# Altium footprint library PcbLib1.PcbLib: 83 footprints (part 6 of 6)
Each footprint in its own frame and in the unit in brackets; x right, y up, seen from the top. Pads: shape width x height; smd on the part's side, far side on the other; paste and mask are expansions set on the pad; w line width, h text height; cw(c..) or ccw(c..) is an arc to the next point about the centre after c.
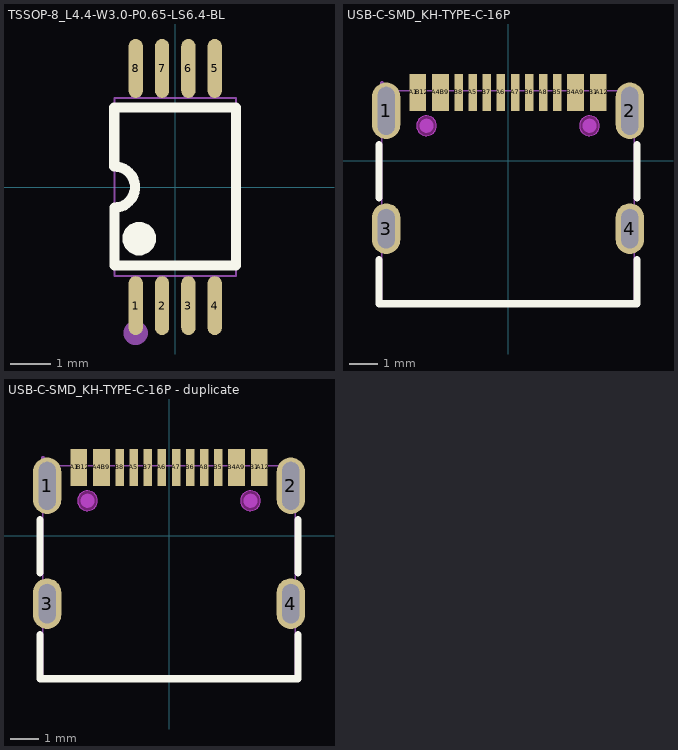
[diagram p5: the footprints below, top view; thin cyan lines are the x and y axes]

## TSSOP-8_L4.4-W3.0-P0.65-LS6.4-BL [mm]
pads (8):
  oval 0.353x1.454 smd paste+0.051: 1(-0.975,-2.927) 2(-0.325,-2.927) 3(0.325,-2.927) 4(0.975,-2.927) 5(0.975,2.927) 6(0.325,2.927) 7(-0.325,2.927) 8(-0.975,2.927)
Top Overlay:
  region: -1.293,-1.27 -1.294,-1.189 -1.233,-1.04 -1.119,-0.925 -0.97,-0.863 -0.808,-0.863 -0.659,-0.925 -0.545,-1.04 -0.484,-1.189 -0.485,-1.27 -0.484,-1.351 -0.545,-1.5 -0.659,-1.615 -0.808,-1.677 -0.97,-1.677 -1.119,-1.615 -1.233,-1.5 -1.294,-1.351 -1.293,-1.27
  lines w0.254: -1.501,1.966 -1.501,0.508 cw(c-1.501,0) -1.5,-0.508 -1.5,-1.938 1.5,-1.938 1.5,1.966 -1.5,1.966
Mechanical 6:
  circle w0.3: c-0.975,-3.6 r0.15
Mechanical 7:
  lines w0.051: -1.5,-2.2 1.5,-2.2 1.5,2.2 -1.5,2.2 -1.5,-2.2
Mechanical 8:
  region: -0.949,-1.27 -0.949,-1.245 -0.914,-1.21 -0.864,-1.21 -0.829,-1.245 -0.829,-1.27 -0.829,-1.295 -0.864,-1.33 -0.914,-1.33 -0.949,-1.295 -0.949,-1.27
Mechanical 9:
  region: 0.865,3.2 0.865,2.7 1.085,2.7 1.085,3.2
  region: 0.215,3.2 0.215,2.7 0.435,2.7 0.435,3.2
  region: -0.435,3.2 -0.435,2.7 -0.215,2.7 -0.215,3.2
  region: -1.085,3.2 -1.085,2.7 -0.865,2.7 -0.865,3.2
  region: 0.865,-3.2 0.865,-2.7 1.085,-2.7 1.085,-3.2
  region: 0.215,-3.2 0.215,-2.7 0.435,-2.7 0.435,-3.2
  region: -0.435,-3.2 -0.435,-2.7 -0.215,-2.7 -0.215,-3.2
  region: -1.085,-3.2 -1.085,-2.7 -0.865,-2.7 -0.865,-3.2
Mechanical 10:
  region: 0.865,2.71 0.865,2.19 1.085,2.19 1.085,2.71
  region: 0.215,2.71 0.215,2.19 0.435,2.19 0.435,2.71
  region: -0.435,2.71 -0.435,2.19 -0.215,2.19 -0.215,2.71
  region: -1.085,2.71 -1.085,2.19 -0.865,2.19 -0.865,2.71
  region: 0.865,-2.71 0.865,-2.19 1.085,-2.19 1.085,-2.71
  region: 0.215,-2.71 0.215,-2.19 0.435,-2.19 0.435,-2.71
  region: -0.435,-2.71 -0.435,-2.19 -0.215,-2.19 -0.215,-2.71
  region: -1.085,-2.71 -1.085,-2.19 -0.865,-2.19 -0.865,-2.71

## USB-C-SMD_KH-TYPE-C-16P [mm]
pads (20):
  oval 1x2 hole 0.6 slot 1.7 at 90 deg paste+0.051: 1(-4.32,1.765) 2(4.32,1.765)
  oval 1x1.8 hole 0.6 slot 1.4 at 90 deg paste+0.051: 3(-4.32,-2.415) 4(4.32,-2.415)
  rect 0.3x1.3 smd paste-100 mask+0.05: A1(-3.35,2.415) A4(-2.55,2.415) A5(-1.25,2.415) A6(-0.25,2.415) A7(0.25,2.415) A8(1.25,2.415) A9(2.55,2.415) A12(3.35,2.415) B1(3.05,2.415) B4(2.25,2.415) B5(1.75,2.415) B6(0.75,2.415) B7(-0.75,2.415) B8(-1.75,2.415) B9(-2.25,2.415) B12(-3.05,2.415)
Top Overlay:
  lines w0.254: -4.572,-3.507 -4.572,-5.08 4.572,-5.08 4.572,-3.507 ; -4.572,-1.323 -4.572,0.573 ; 4.572,-1.323 4.572,0.573
Top Paste:
  drawing of 16 lines, arcs and shapes, not listed
Keep-Out Layer:
  circle w0.003: c-2.89,1.235 r0.35
  circle w0.003: c2.89,1.235 r0.35
  region: -2.54,1.235 -2.54,1.165 -2.593,1.037 -2.692,0.938 -2.82,0.885 -2.96,0.885 -3.088,0.938 -3.187,1.037 -3.24,1.165 -3.24,1.235 -3.24,1.305 -3.187,1.433 -3.088,1.532 -2.96,1.585 -2.82,1.585 -2.692,1.532 -2.593,1.433 -2.54,1.305 -2.54,1.235
  region: -2.54,1.235 -2.54,1.165 -2.593,1.037 -2.692,0.938 -2.82,0.885 -2.96,0.885 -3.088,0.938 -3.187,1.037 -3.24,1.165 -3.24,1.235 -3.24,1.305 -3.187,1.433 -3.088,1.532 -2.96,1.585 -2.82,1.585 -2.692,1.532 -2.593,1.433 -2.54,1.305 -2.54,1.235
  region: 3.24,1.235 3.24,1.165 3.187,1.037 3.088,0.938 2.96,0.885 2.82,0.885 2.692,0.938 2.593,1.037 2.54,1.165 2.54,1.235 2.54,1.305 2.593,1.433 2.692,1.532 2.82,1.585 2.96,1.585 3.088,1.532 3.187,1.433 3.24,1.305 3.24,1.235
  region: 3.24,1.235 3.24,1.165 3.187,1.037 3.088,0.938 2.96,0.885 2.82,0.885 2.692,0.938 2.593,1.037 2.54,1.165 2.54,1.235 2.54,1.305 2.593,1.433 2.692,1.532 2.82,1.585 2.96,1.585 3.088,1.532 3.187,1.433 3.24,1.305 3.24,1.235
Mechanical 1:
  circle w0.003: c-2.89,1.235 r0.35
  circle w0.003: c2.89,1.235 r0.35
Mechanical 6:
  circle w0.25: c-2.89,1.235 r0.125
  circle w0.25: c2.89,1.235 r0.125
Mechanical 7:
  lines w0.051: -4.47,-5.08 -4.47,2.47 4.47,2.47 4.47,-5.08 -4.47,-5.08
Mechanical 8:
  region: -4.41,2.76 -4.41,2.735 -4.445,2.7 -4.495,2.7 -4.53,2.735 -4.53,2.76 -4.53,2.785 -4.495,2.82 -4.445,2.82 -4.41,2.785 -4.41,2.76
Mechanical 9:
  region: -4.47,2.315 -4.17,2.315 -4.17,1.215 -4.47,1.215
  region: 4.17,2.315 4.47,2.315 4.47,1.215 4.17,1.215
  region: -4.47,-2.015 -4.17,-2.015 -4.17,-2.815 -4.47,-2.815
  region: 4.17,-2.015 4.47,-2.015 4.47,-2.815 4.17,-2.815
  region: 1.15,2.76 1.35,2.76 1.35,1.76 1.15,1.76
  region: 1.65,2.76 1.85,2.76 1.85,1.76 1.65,1.76
  region: 0.65,2.76 0.85,2.76 0.85,1.76 0.65,1.76
  region: 0.15,2.76 0.35,2.76 0.35,1.76 0.15,1.76
  region: -0.35,2.76 -0.15,2.76 -0.15,1.76 -0.35,1.76
  region: -0.85,2.76 -0.65,2.76 -0.65,1.76 -0.85,1.76
  region: -1.35,2.76 -1.15,2.76 -1.15,1.76 -1.35,1.76
  region: -1.85,2.76 -1.65,2.76 -1.65,1.76 -1.85,1.76
  region: 3,2.76 3.2,2.76 3.2,1.76 3,1.76
  region: 3.2,2.76 3.4,2.76 3.4,1.76 3.2,1.76
  region: 2.2,2.76 2.4,2.76 2.4,1.76 2.2,1.76
  region: 2.4,2.76 2.6,2.76 2.6,1.76 2.4,1.76
  region: -2.6,2.76 -2.4,2.76 -2.4,1.76 -2.6,1.76
  region: -2.4,2.76 -2.2,2.76 -2.2,1.76 -2.4,1.76
  region: -3.4,2.76 -3.2,2.76 -3.2,1.76 -3.4,1.76
  region: -3.2,2.76 -3,2.76 -3,1.76 -3.2,1.76

## USB-C-SMD_KH-TYPE-C-16P - duplicate [mm]
pads (20):
  oval 1x2 hole 0.6 slot 1.7 at 90 deg: 1(-4.32,1.765) 2(4.32,1.765)
  oval 1x1.8 hole 0.6 slot 1.4 at 90 deg: 3(-4.32,-2.415) 4(4.32,-2.415)
  rect 0.3x1.3 smd paste-100 mask+0.05: A1(-3.35,2.415) A4(-2.55,2.415) A5(-1.25,2.415) A6(-0.25,2.415) A7(0.25,2.415) A8(1.25,2.415) A9(2.55,2.415) A12(3.35,2.415) B1(3.05,2.415) B4(2.25,2.415) B5(1.75,2.415) B6(0.75,2.415) B7(-0.75,2.415) B8(-1.75,2.415) B9(-2.25,2.415) B12(-3.05,2.415)
Top Overlay:
  lines w0.254: -4.572,-3.507 -4.572,-5.08 4.572,-5.08 4.572,-3.507 ; -4.572,-1.323 -4.572,0.573 ; 4.572,-1.323 4.572,0.573
Top Paste:
  drawing of 16 lines, arcs and shapes, not listed
Keep-Out Layer:
  board cut-out: -2.54,1.235 -2.54,1.215 -2.544,1.176 -2.553,1.138 -2.566,1.101 -2.583,1.065 -2.604,1.032 -2.629,1.001 -2.656,0.974 -2.687,0.949 -2.72,0.928 -2.756,0.911 -2.793,0.898 -2.831,0.889 -2.87,0.885 -2.91,0.885 -2.949,0.889 -2.987,0.898 -3.024,0.911 -3.06,0.928 -3.093,0.949 -3.124,0.974 -3.151,1.001 -3.176,1.032 -3.197,1.065 -3.214,1.101 -3.227,1.138 -3.236,1.176 -3.24,1.215 -3.24,1.235 -3.24,1.255 -3.236,1.294 -3.227,1.332 -3.214,1.369 -3.197,1.404 -3.176,1.438 -3.151,1.469 -3.124,1.496 -3.093,1.521 -3.06,1.542 -3.024,1.559 -2.987,1.572 -2.949,1.581 -2.91,1.585 -2.87,1.585 -2.831,1.581 -2.793,1.572 -2.756,1.559 -2.72,1.542 -2.687,1.521 -2.656,1.496 -2.629,1.469 -2.604,1.438 -2.583,1.404 -2.566,1.369 -2.553,1.332 -2.544,1.294 -2.54,1.255 -2.54,1.235
  board cut-out: 3.24,1.235 3.24,1.215 3.236,1.176 3.227,1.138 3.214,1.101 3.197,1.065 3.176,1.032 3.151,1.001 3.124,0.974 3.093,0.949 3.06,0.928 3.024,0.911 2.987,0.898 2.949,0.889 2.91,0.885 2.87,0.885 2.831,0.889 2.793,0.898 2.756,0.911 2.72,0.928 2.687,0.949 2.656,0.974 2.629,1.001 2.604,1.032 2.583,1.065 2.566,1.101 2.553,1.138 2.544,1.176 2.54,1.215 2.54,1.235 2.54,1.255 2.544,1.294 2.553,1.332 2.566,1.369 2.583,1.404 2.604,1.438 2.629,1.469 2.656,1.496 2.687,1.521 2.72,1.542 2.756,1.559 2.793,1.572 2.831,1.581 2.87,1.585 2.91,1.585 2.949,1.581 2.987,1.572 3.024,1.559 3.06,1.542 3.093,1.521 3.124,1.496 3.151,1.469 3.176,1.438 3.197,1.404 3.214,1.369 3.227,1.332 3.236,1.294 3.24,1.255 3.24,1.235
Keep-Out Layer:
  drawing of 6 lines, arcs and shapes, not listed
Mechanical 1:
  circle w0.003: c-2.89,1.235 r0.35
  circle w0.003: c2.89,1.235 r0.35
Mechanical 2:
  circle w0.25: c-2.89,1.235 r0.125
  circle w0.25: c2.89,1.235 r0.125
Mechanical 6:
  lines w0.051: -4.47,-5.08 -4.47,2.47 4.47,2.47 4.47,-5.08 -4.47,-5.08
Mechanical 8:
  region: -4.41,2.76 -4.41,2.755 -4.412,2.746 -4.415,2.737 -4.419,2.728 -4.424,2.721 -4.431,2.714 -4.439,2.708 -4.447,2.704 -4.456,2.701 -4.465,2.7 -4.475,2.7 -4.484,2.701 -4.493,2.704 -4.502,2.708 -4.509,2.714 -4.516,2.721 -4.521,2.728 -4.526,2.737 -4.529,2.746 -4.53,2.755 -4.53,2.76 -4.53,2.764 -4.529,2.774 -4.526,2.783 -4.521,2.791 -4.516,2.799 -4.509,2.805 -4.502,2.811 -4.493,2.815 -4.484,2.818 -4.475,2.82 -4.465,2.82 -4.456,2.818 -4.447,2.815 -4.439,2.811 -4.431,2.805 -4.424,2.799 -4.419,2.791 -4.415,2.783 -4.412,2.774 -4.41,2.764 -4.41,2.76
Mechanical 9:
  region: -4.47,2.315 -4.17,2.315 -4.17,1.215 -4.47,1.215
  region: 4.17,2.315 4.47,2.315 4.47,1.215 4.17,1.215
  region: -4.47,-2.015 -4.17,-2.015 -4.17,-2.815 -4.47,-2.815
  region: 4.17,-2.015 4.47,-2.015 4.47,-2.815 4.17,-2.815
  region: 1.15,2.76 1.35,2.76 1.35,1.76 1.15,1.76
  region: 1.65,2.76 1.85,2.76 1.85,1.76 1.65,1.76
  region: 0.65,2.76 0.85,2.76 0.85,1.76 0.65,1.76
  region: 0.15,2.76 0.35,2.76 0.35,1.76 0.15,1.76
  region: -0.35,2.76 -0.15,2.76 -0.15,1.76 -0.35,1.76
  region: -0.85,2.76 -0.65,2.76 -0.65,1.76 -0.85,1.76
  region: -1.35,2.76 -1.15,2.76 -1.15,1.76 -1.35,1.76
  region: -1.85,2.76 -1.65,2.76 -1.65,1.76 -1.85,1.76
  region: 3,2.76 3.2,2.76 3.2,1.76 3,1.76
  region: 3.2,2.76 3.4,2.76 3.4,1.76 3.2,1.76
  region: 2.2,2.76 2.4,2.76 2.4,1.76 2.2,1.76
  region: 2.4,2.76 2.6,2.76 2.6,1.76 2.4,1.76
  region: -2.6,2.76 -2.4,2.76 -2.4,1.76 -2.6,1.76
  region: -2.4,2.76 -2.2,2.76 -2.2,1.76 -2.4,1.76
  region: -3.4,2.76 -3.2,2.76 -3.2,1.76 -3.4,1.76
  region: -3.2,2.76 -3,2.76 -3,1.76 -3.2,1.76